# Altium schematic symbol library 0885002.DR.SchLib: 1 symbol
Pins are listed as number, name and electrical type; pins without a type are passive.

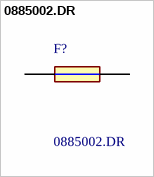
[diagram p0: symbol 0885002.DR]

## 0885002.DR
designator F?
FUSE 500V HBC NANO2 PB-FREE 2A; Manufacturer_Name: LITTELFUSE; Geometry.Height: 4.88mm; Manufacturer_Part_Number: 0885002.DR; Mouser Part Number: 576-0885002.DR; Mouser Price/Stock: https://www.mouser.co.uk/ProductDetail/Littelfuse/0885002DR?qs=r5DSvlrkXmJ9HpdhRI%2F6Zg%3D%3D; Arrow Part Number: 0885002.DR; Arrow Price/Stock: https://www.arrow.com/en/products/0885002.dr/littelfuse; Datasheet Link: https://cdn1-originals.webdamdb.com/12956_127233717?cache=1638230044&response-content-disposition=inline;filename=Littelfuse_Fuse_885_Datasheet.pdf&response-content-type=application/pdf&Policy=eyJTdGF0ZW1lbnQiOlt7IlJlc291cmNlIjoiaHR0cCo6Ly9jZG4xLW9yaWdpbm
footprint FUSC10948X488N
pins: 1, 2